# Altium footprint library WR-PHD_Socket Header.PcbLib: 279 footprints (part 12 of 18)
Each footprint in its own frame and in the unit in brackets; x right, y up, seen from the top. Pads: shape width x height; smd on the part's side, far side on the other; paste and mask are expansions set on the pad; w line width, h text height; cw(c..) or ccw(c..) is an arc to the next point about the centre after c.
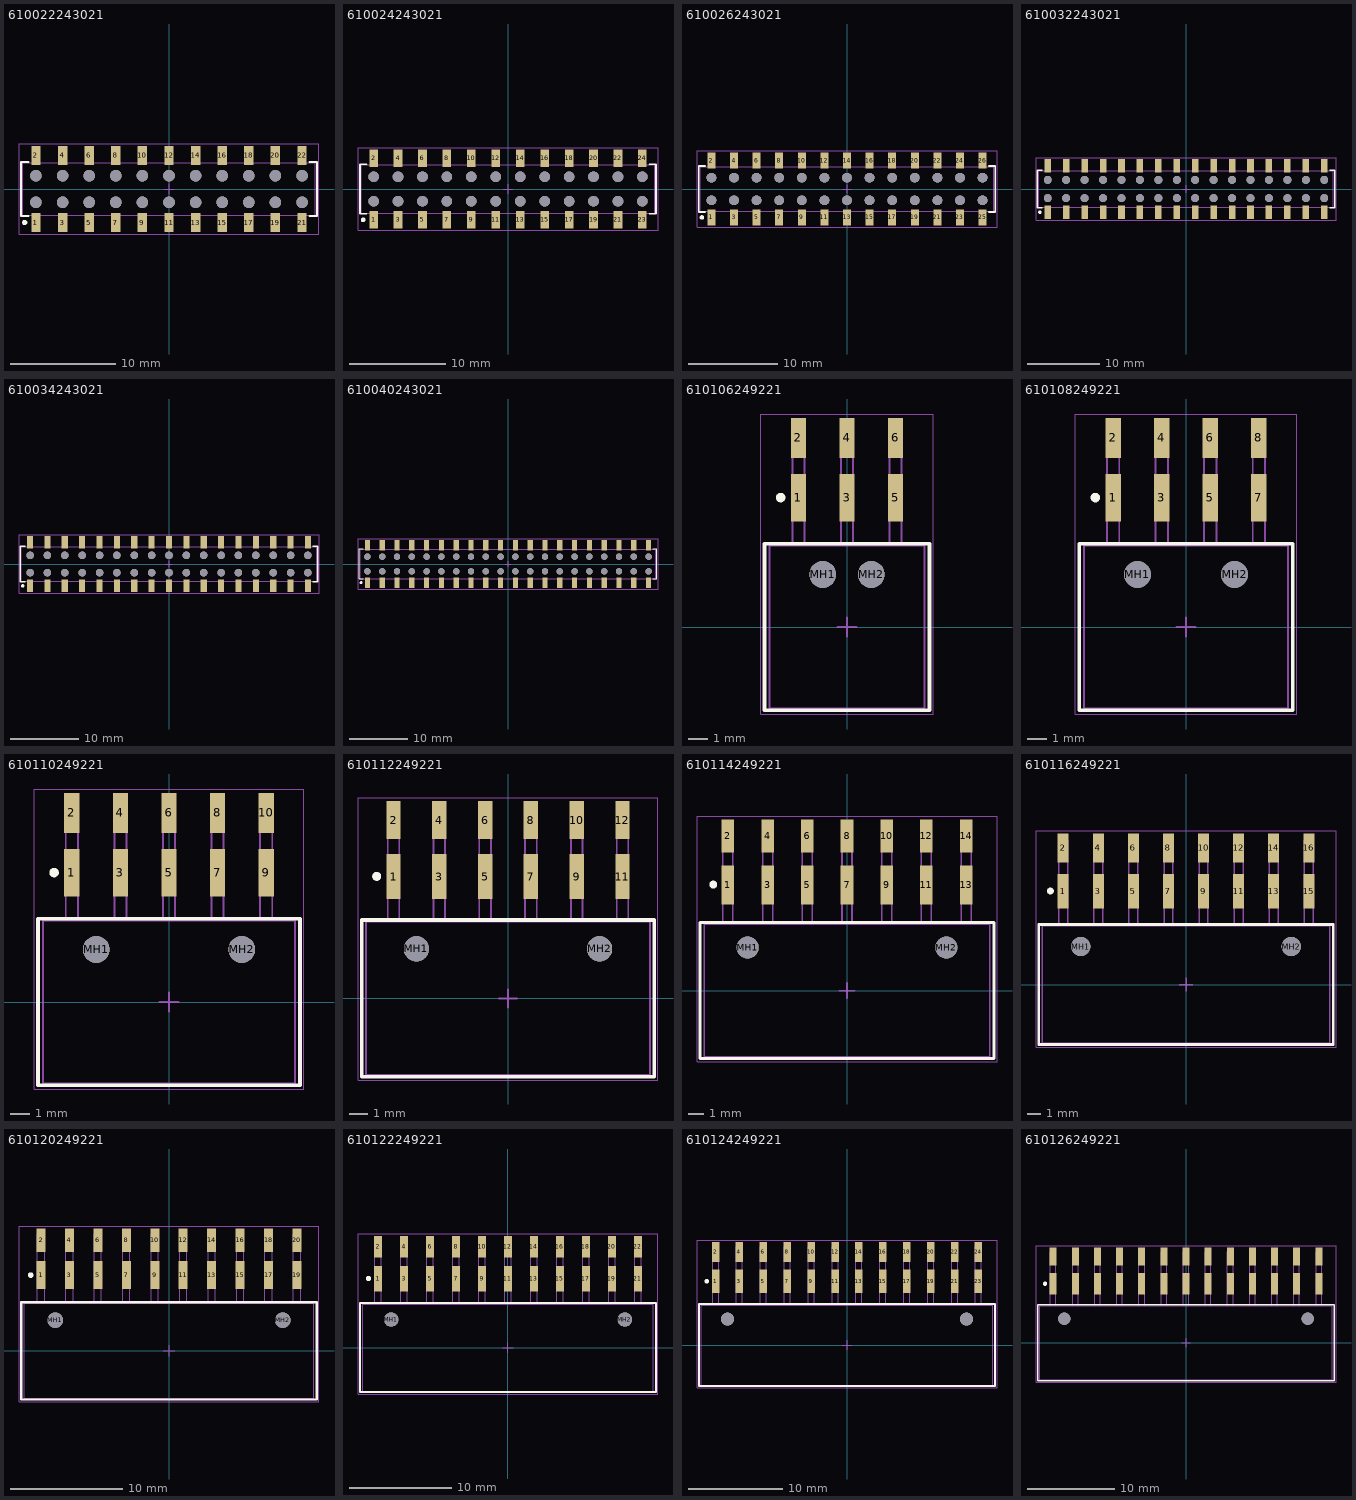
[diagram p11: the footprints below, top view; thin cyan lines are the x and y axes]

## 610022243021 [mm] "Socket Header, Pitch 2.54 mm, SMT, Vertical, dual row, 22p"
height 3.7
pads (44):
  rect 0.9x1.8 smd: 1(-12.7,-3.2) 2(-12.7,3.2) 3(-10.16,-3.2) 4(-10.16,3.2) 5(-7.62,-3.2) 6(-7.62,3.2) 7(-5.08,-3.2) 8(-5.08,3.2) 9(-2.54,-3.2) 10(-2.54,3.2) 11(0,-3.2) 12(0,3.2) 13(2.54,-3.2) 14(2.54,3.2) 15(5.08,-3.2) 16(5.08,3.2) 17(7.62,-3.2) 18(7.62,3.2) 19(10.16,-3.2) 20(10.16,3.2) 21(12.7,-3.2) 22(12.7,3.2)
  round 1.1 hole 1.1 unplated: MH1(-12.7,-1.27) MH2(-12.7,1.27) MH3(-10.16,-1.27) MH4(-10.16,1.27) MH5(-7.62,-1.27) MH6(-7.62,1.27) MH7(-5.08,-1.27) MH8(-5.08,1.27) MH9(-2.54,-1.27) MH10(-2.54,1.27) MH11(0,-1.27) MH12(0,1.27) MH13(2.54,-1.27) MH14(2.54,1.27) MH15(5.08,-1.27) MH16(5.08,1.27) MH17(7.62,-1.27) MH18(7.62,1.27) MH19(10.16,-1.27) MH20(10.16,1.27) MH21(12.7,-1.27) MH22(12.7,1.27)
Top Overlay:
  circle w0.25: c-13.78,-3.2 r0.125
  lines w0.2: -13.43,-2.575 -14.12,-2.575 -14.12,2.575 -13.43,2.575 ; 13.43,-2.575 14.12,-2.575 14.12,2.575 13.43,2.575
Top Component Outline:
  lines w0.1: -12.95,-2.5 -12.95,-3.6 -12.45,-3.6 -12.45,-2.5 ; -12.95,2.5 -12.95,3.6 -12.45,3.6 -12.45,2.5 ; -10.41,-2.5 -10.41,-3.6 -9.91,-3.6 -9.91,-2.5 ; -10.41,2.5 -10.41,3.6 -9.91,3.6 -9.91,2.5 ; -7.87,-2.5 -7.87,-3.6 -7.37,-3.6 -7.37,-2.5 ; -7.87,2.5 -7.87,3.6 -7.37,3.6 -7.37,2.5 ; -5.33,-2.5 -5.33,-3.6 -4.83,-3.6 -4.83,-2.5 ; -5.33,2.5 -5.33,3.6 -4.83,3.6 -4.83,2.5 ; -2.79,-2.5 -2.79,-3.6 -2.29,-3.6 -2.29,-2.5 ; -2.79,2.5 -2.79,3.6 -2.29,3.6 -2.29,2.5 ; -0.25,-2.5 -0.25,-3.6 0.25,-3.6 0.25,-2.5 ; -0.25,2.5 -0.25,3.6 0.25,3.6 0.25,2.5 ; 2.29,-2.5 2.29,-3.6 2.79,-3.6 2.79,-2.5 ; 2.29,2.5 2.29,3.6 2.79,3.6 2.79,2.5 ; 4.83,-2.5 4.83,-3.6 5.33,-3.6 5.33,-2.5 ; 4.83,2.5 4.83,3.6 5.33,3.6 5.33,2.5 ; 7.37,-2.5 7.37,-3.6 7.87,-3.6 7.87,-2.5 ; 7.37,2.5 7.37,3.6 7.87,3.6 7.87,2.5 ; 9.91,-2.5 9.91,-3.6 10.41,-3.6 10.41,-2.5 ; 9.91,2.5 9.91,3.6 10.41,3.6 10.41,2.5 ; 12.45,-2.5 12.45,-3.6 12.95,-3.6 12.95,-2.5 ; 12.45,2.5 12.45,3.6 12.95,3.6 12.95,2.5 ; -13.97,-2.5 -13.97,2.5 13.97,2.5 13.97,-2.5 -13.97,-2.5
Top Designator:
  text ".Designator" at -3.647,-0.357 h1
Top Courtyard:
  lines w0.05: -14.32,-4.3 -14.32,4.3 14.32,4.3 14.32,-4.3 -14.32,-4.3
Top Component Center:
  lines w0.1: -0.5,0 0.5,0 ; 0,-0.5 0,0.5
3D body "610022243021.stp": height 3.7, standoff 0, extent -13.97,-3.603 13.97,3.603

## 610024243021 [mm] "Socket Header, Pitch 2.54 mm, SMT, Vertical, dual row, 24p"
height 3.7
pads (48):
  rect 0.9x1.8 smd: 1(-13.97,-3.2) 2(-13.97,3.2) 3(-11.43,-3.2) 4(-11.43,3.2) 5(-8.89,-3.2) 6(-8.89,3.2) 7(-6.35,-3.2) 8(-6.35,3.2) 9(-3.81,-3.2) 10(-3.81,3.2) 11(-1.27,-3.2) 12(-1.27,3.2) 13(1.27,-3.2) 14(1.27,3.2) 15(3.81,-3.2) 16(3.81,3.2) 17(6.35,-3.2) 18(6.35,3.2) 19(8.89,-3.2) 20(8.89,3.2) 21(11.43,-3.2) 22(11.43,3.2) 23(13.97,-3.2) 24(13.97,3.2)
  round 1.1 hole 1.1 unplated: MH1(-13.97,-1.27) MH2(-13.97,1.27) MH3(-11.43,-1.27) MH4(-11.43,1.27) MH5(-8.89,-1.27) MH6(-8.89,1.27) MH7(-6.35,-1.27) MH8(-6.35,1.27) MH9(-3.81,-1.27) MH10(-3.81,1.27) MH11(-1.27,-1.27) MH12(-1.27,1.27) MH13(1.27,-1.27) MH14(1.27,1.27) MH15(3.81,-1.27) MH16(3.81,1.27) MH17(6.35,-1.27) MH18(6.35,1.27) MH19(8.89,-1.27) MH20(8.89,1.27) MH21(11.43,-1.27) MH22(11.43,1.27) MH23(13.97,-1.27) MH24(13.97,1.27)
Top Overlay:
  circle w0.25: c-15.05,-3.2 r0.125
  lines w0.2: -14.7,-2.575 -15.39,-2.575 -15.39,2.575 -14.7,2.575 ; 14.7,-2.575 15.39,-2.575 15.39,2.575 14.7,2.575
Top Component Outline:
  lines w0.1: -14.22,-2.5 -14.22,-3.6 -13.72,-3.6 -13.72,-2.5 ; -14.22,2.5 -14.22,3.6 -13.72,3.6 -13.72,2.5 ; -11.68,-2.5 -11.68,-3.6 -11.18,-3.6 -11.18,-2.5 ; -11.68,2.5 -11.68,3.6 -11.18,3.6 -11.18,2.5 ; -9.14,-2.5 -9.14,-3.6 -8.64,-3.6 -8.64,-2.5 ; -9.14,2.5 -9.14,3.6 -8.64,3.6 -8.64,2.5 ; -6.6,-2.5 -6.6,-3.6 -6.1,-3.6 -6.1,-2.5 ; -6.6,2.5 -6.6,3.6 -6.1,3.6 -6.1,2.5 ; -4.06,-2.5 -4.06,-3.6 -3.56,-3.6 -3.56,-2.5 ; -4.06,2.5 -4.06,3.6 -3.56,3.6 -3.56,2.5 ; -1.52,-2.5 -1.52,-3.6 -1.02,-3.6 -1.02,-2.5 ; -1.52,2.5 -1.52,3.6 -1.02,3.6 -1.02,2.5 ; 1.02,-2.5 1.02,-3.6 1.52,-3.6 1.52,-2.5 ; 1.02,2.5 1.02,3.6 1.52,3.6 1.52,2.5 ; 3.56,-2.5 3.56,-3.6 4.06,-3.6 4.06,-2.5 ; 3.56,2.5 3.56,3.6 4.06,3.6 4.06,2.5 ; 6.1,-2.5 6.1,-3.6 6.6,-3.6 6.6,-2.5 ; 6.1,2.5 6.1,3.6 6.6,3.6 6.6,2.5 ; 8.64,-2.5 8.64,-3.6 9.14,-3.6 9.14,-2.5 ; 8.64,2.5 8.64,3.6 9.14,3.6 9.14,2.5 ; 11.18,-2.5 11.18,-3.6 11.68,-3.6 11.68,-2.5 ; 11.18,2.5 11.18,3.6 11.68,3.6 11.68,2.5 ; 13.72,-2.5 13.72,-3.6 14.22,-3.6 14.22,-2.5 ; 13.72,2.5 13.72,3.6 14.22,3.6 14.22,2.5 ; -15.24,-2.5 -15.24,2.5 15.24,2.5 15.24,-2.5 -15.24,-2.5
Top Designator:
  text ".Designator" at -3.647,-0.357 h1
Top Courtyard:
  lines w0.05: -15.59,-4.3 -15.59,4.3 15.59,4.3 15.59,-4.3 -15.59,-4.3
Top Component Center:
  lines w0.1: -0.5,0 0.5,0 ; 0,-0.5 0,0.5
3D body "610024243021.stp": height 3.7, standoff 0, extent -15.24,-3.603 15.24,3.603

## 610026243021 [mm] "Socket Header, Pitch 2.54 mm, SMT, Vertical, dual row, 26p"
height 3.7
pads (52):
  rect 0.9x1.8 smd: 1(-15.24,-3.2) 2(-15.24,3.2) 3(-12.7,-3.2) 4(-12.7,3.2) 5(-10.16,-3.2) 6(-10.16,3.2) 7(-7.62,-3.2) 8(-7.62,3.2) 9(-5.08,-3.2) 10(-5.08,3.2) 11(-2.54,-3.2) 12(-2.54,3.2) 13(0,-3.2) 14(0,3.2) 15(2.54,-3.2) 16(2.54,3.2) 17(5.08,-3.2) 18(5.08,3.2) 19(7.62,-3.2) 20(7.62,3.2) 21(10.16,-3.2) 22(10.16,3.2) 23(12.7,-3.2) 24(12.7,3.2) 25(15.24,-3.2) 26(15.24,3.2)
  round 1.1 hole 1.1 unplated: MH1(-15.24,-1.27) MH2(-15.24,1.27) MH3(-12.7,-1.27) MH4(-12.7,1.27) MH5(-10.16,-1.27) MH6(-10.16,1.27) MH7(-7.62,-1.27) MH8(-7.62,1.27) MH9(-5.08,-1.27) MH10(-5.08,1.27) MH11(-2.54,-1.27) MH12(-2.54,1.27) MH13(0,-1.27) MH14(0,1.27) MH15(2.54,-1.27) MH16(2.54,1.27) MH17(5.08,-1.27) MH18(5.08,1.27) MH19(7.62,-1.27) MH20(7.62,1.27) MH21(10.16,-1.27) MH22(10.16,1.27) MH23(12.7,-1.27) MH24(12.7,1.27) MH25(15.24,-1.27) MH26(15.24,1.27)
Top Overlay:
  circle w0.25: c-16.32,-3.2 r0.125
  lines w0.2: -15.97,-2.575 -16.66,-2.575 -16.66,2.575 -15.97,2.575 ; 15.97,-2.575 16.66,-2.575 16.66,2.575 15.97,2.575
Top Component Outline:
  lines w0.1: -15.49,-2.5 -15.49,-3.6 -14.99,-3.6 -14.99,-2.5 ; -15.49,2.5 -15.49,3.6 -14.99,3.6 -14.99,2.5 ; -12.95,-2.5 -12.95,-3.6 -12.45,-3.6 -12.45,-2.5 ; -12.95,2.5 -12.95,3.6 -12.45,3.6 -12.45,2.5 ; -10.41,-2.5 -10.41,-3.6 -9.91,-3.6 -9.91,-2.5 ; -10.41,2.5 -10.41,3.6 -9.91,3.6 -9.91,2.5 ; -7.87,-2.5 -7.87,-3.6 -7.37,-3.6 -7.37,-2.5 ; -7.87,2.5 -7.87,3.6 -7.37,3.6 -7.37,2.5 ; -5.33,-2.5 -5.33,-3.6 -4.83,-3.6 -4.83,-2.5 ; -5.33,2.5 -5.33,3.6 -4.83,3.6 -4.83,2.5 ; -2.79,-2.5 -2.79,-3.6 -2.29,-3.6 -2.29,-2.5 ; -2.79,2.5 -2.79,3.6 -2.29,3.6 -2.29,2.5 ; -0.25,-2.5 -0.25,-3.6 0.25,-3.6 0.25,-2.5 ; -0.25,2.5 -0.25,3.6 0.25,3.6 0.25,2.5 ; 2.29,-2.5 2.29,-3.6 2.79,-3.6 2.79,-2.5 ; 2.29,2.5 2.29,3.6 2.79,3.6 2.79,2.5 ; 4.83,-2.5 4.83,-3.6 5.33,-3.6 5.33,-2.5 ; 4.83,2.5 4.83,3.6 5.33,3.6 5.33,2.5 ; 7.37,-2.5 7.37,-3.6 7.87,-3.6 7.87,-2.5 ; 7.37,2.5 7.37,3.6 7.87,3.6 7.87,2.5 ; 9.91,-2.5 9.91,-3.6 10.41,-3.6 10.41,-2.5 ; 9.91,2.5 9.91,3.6 10.41,3.6 10.41,2.5 ; 12.45,-2.5 12.45,-3.6 12.95,-3.6 12.95,-2.5 ; 12.45,2.5 12.45,3.6 12.95,3.6 12.95,2.5 ; 14.99,-2.5 14.99,-3.6 15.49,-3.6 15.49,-2.5 ; 14.99,2.5 14.99,3.6 15.49,3.6 15.49,2.5 ; -16.51,-2.5 -16.51,2.5 16.51,2.5 16.51,-2.5 -16.51,-2.5
Top Designator:
  text ".Designator" at -3.647,-0.357 h1
Top Courtyard:
  lines w0.05: -16.86,-4.3 16.86,-4.3 16.86,4.3 -16.86,4.3 -16.86,-4.3
Top Component Center:
  lines w0.1: -0.5,0 0.5,0 ; 0,-0.5 0,0.5
3D body "610026243021.stp": height 3.7, standoff 0, extent -16.51,-3.603 16.51,3.603

## 610032243021 [mm] "Socket Header, Pitch 2.54 mm, SMT, Vertical, dual row, 32p"
height 3.7
pads (64):
  rect 0.9x1.8 smd: 1(-19.05,-3.2) 2(-19.05,3.2) 3(-16.51,-3.2) 4(-16.51,3.2) 5(-13.97,-3.2) 6(-13.97,3.2) 7(-11.43,-3.2) 8(-11.43,3.2) 9(-8.89,-3.2) 10(-8.89,3.2) 11(-6.35,-3.2) 12(-6.35,3.2) 13(-3.81,-3.2) 14(-3.81,3.2) 15(-1.27,-3.2) 16(-1.27,3.2) 17(1.27,-3.2) 18(1.27,3.2) 19(3.81,-3.2) 20(3.81,3.2) 21(6.35,-3.2) 22(6.35,3.2) 23(8.89,-3.2) 24(8.89,3.2) 25(11.43,-3.2) 26(11.43,3.2) 27(13.97,-3.2) 28(13.97,3.2) 29(16.51,-3.2) 30(16.51,3.2) 31(19.05,-3.2) 32(19.05,3.2)
  round 1.1 hole 1.1 unplated: MH1(-19.05,-1.27) MH2(-19.05,1.27) MH3(-16.51,-1.27) MH4(-16.51,1.27) MH5(-13.97,-1.27) MH6(-13.97,1.27) MH7(-11.43,-1.27) MH8(-11.43,1.27) MH9(-8.89,-1.27) MH10(-8.89,1.27) MH11(-6.35,-1.27) MH12(-6.35,1.27) MH13(-3.81,-1.27) MH14(-3.81,1.27) MH15(-1.27,-1.27) MH16(-1.27,1.27) MH17(1.27,-1.27) MH18(1.27,1.27) MH19(3.81,-1.27) MH20(3.81,1.27) MH21(6.35,-1.27) MH22(6.35,1.27) MH23(8.89,-1.27) MH24(8.89,1.27) MH25(11.43,-1.27) MH26(11.43,1.27) MH27(13.97,-1.27) MH28(13.97,1.27) MH29(16.51,-1.27) MH30(16.51,1.27) MH31(19.05,-1.27) MH32(19.05,1.27)
Top Overlay:
  circle w0.25: c-20.13,-3.2 r0.125
  lines w0.2: -19.78,-2.575 -20.47,-2.575 -20.47,2.575 -19.78,2.575 ; 19.78,-2.575 20.47,-2.575 20.47,2.575 19.78,2.575
Top Component Outline:
  lines w0.1: -19.3,-2.5 -19.3,-3.6 -18.8,-3.6 -18.8,-2.5 ; -19.3,2.5 -19.3,3.6 -18.8,3.6 -18.8,2.5 ; -16.76,-2.5 -16.76,-3.6 -16.26,-3.6 -16.26,-2.5 ; -16.76,2.5 -16.76,3.6 -16.26,3.6 -16.26,2.5 ; -14.22,-2.5 -14.22,-3.6 -13.72,-3.6 -13.72,-2.5 ; -14.22,2.5 -14.22,3.6 -13.72,3.6 -13.72,2.5 ; -11.68,-2.5 -11.68,-3.6 -11.18,-3.6 -11.18,-2.5 ; -11.68,2.5 -11.68,3.6 -11.18,3.6 -11.18,2.5 ; -9.14,-2.5 -9.14,-3.6 -8.64,-3.6 -8.64,-2.5 ; -9.14,2.5 -9.14,3.6 -8.64,3.6 -8.64,2.5 ; -6.6,-2.5 -6.6,-3.6 -6.1,-3.6 -6.1,-2.5 ; -6.6,2.5 -6.6,3.6 -6.1,3.6 -6.1,2.5 ; -4.06,-2.5 -4.06,-3.6 -3.56,-3.6 -3.56,-2.5 ; -4.06,2.5 -4.06,3.6 -3.56,3.6 -3.56,2.5 ; -1.52,-2.5 -1.52,-3.6 -1.02,-3.6 -1.02,-2.5 ; -1.52,2.5 -1.52,3.6 -1.02,3.6 -1.02,2.5 ; 1.02,-2.5 1.02,-3.6 1.52,-3.6 1.52,-2.5 ; 1.02,2.5 1.02,3.6 1.52,3.6 1.52,2.5 ; 3.56,-2.5 3.56,-3.6 4.06,-3.6 4.06,-2.5 ; 3.56,2.5 3.56,3.6 4.06,3.6 4.06,2.5 ; 6.1,-2.5 6.1,-3.6 6.6,-3.6 6.6,-2.5 ; 6.1,2.5 6.1,3.6 6.6,3.6 6.6,2.5 ; 8.64,-2.5 8.64,-3.6 9.14,-3.6 9.14,-2.5 ; 8.64,2.5 8.64,3.6 9.14,3.6 9.14,2.5 ; 11.18,-2.5 11.18,-3.6 11.68,-3.6 11.68,-2.5 ; 11.18,2.5 11.18,3.6 11.68,3.6 11.68,2.5 ; 13.72,-2.5 13.72,-3.6 14.22,-3.6 14.22,-2.5 ; 13.72,2.5 13.72,3.6 14.22,3.6 14.22,2.5 ; 16.26,-2.5 16.26,-3.6 16.76,-3.6 16.76,-2.5 ; 16.26,2.5 16.26,3.6 16.76,3.6 16.76,2.5 ; 18.8,-2.5 18.8,-3.6 19.3,-3.6 19.3,-2.5 ; 18.8,2.5 18.8,3.6 19.3,3.6 19.3,2.5 ; -20.32,-2.5 -20.32,2.5 20.32,2.5 20.32,-2.5 -20.32,-2.5
Top Designator:
  text ".Designator" at -3.647,-0.357 h1
Top Courtyard:
  lines w0.05: -20.67,-4.3 20.67,-4.3 20.67,4.3 -20.67,4.3 -20.67,-4.3
Top Component Center:
  lines w0.1: -0.5,0 0.5,0 ; 0,-0.5 0,0.5
3D body "610032243021.stp": height 3.7, standoff 0, extent -20.32,-3.603 20.32,3.603

## 610034243021 [mm] "Socket Header, Pitch 2.54 mm, SMT, Vertical, dual row, 34p"
height 3.7
pads (68):
  rect 0.9x1.8 smd: 1(-20.32,-3.2) 2(-20.32,3.2) 3(-17.78,-3.2) 4(-17.78,3.2) 5(-15.24,-3.2) 6(-15.24,3.2) 7(-12.7,-3.2) 8(-12.7,3.2) 9(-10.16,-3.2) 10(-10.16,3.2) 11(-7.62,-3.2) 12(-7.62,3.2) 13(-5.08,-3.2) 14(-5.08,3.2) 15(-2.54,-3.2) 16(-2.54,3.2) 17(0,-3.2) 18(0,3.2) 19(2.54,-3.2) 20(2.54,3.2) 21(5.08,-3.2) 22(5.08,3.2) 23(7.62,-3.2) 24(7.62,3.2) 25(10.16,-3.2) 26(10.16,3.2) 27(12.7,-3.2) 28(12.7,3.2) 29(15.24,-3.2) 30(15.24,3.2) 31(17.78,-3.2) 32(17.78,3.2) 33(20.32,-3.2) 34(20.32,3.2)
  round 1.1 hole 1.1 unplated: MH1(-20.32,-1.27) MH2(-20.32,1.27) MH3(-17.78,-1.27) MH4(-17.78,1.27) MH5(-15.24,-1.27) MH6(-15.24,1.27) MH7(-12.7,-1.27) MH8(-12.7,1.27) MH9(-10.16,-1.27) MH10(-10.16,1.27) MH11(-7.62,-1.27) MH12(-7.62,1.27) MH13(-5.08,-1.27) MH14(-5.08,1.27) MH15(-2.54,-1.27) MH16(-2.54,1.27) MH17(0,-1.27) MH18(0,1.27) MH19(2.54,-1.27) MH20(2.54,1.27) MH21(5.08,-1.27) MH22(5.08,1.27) MH23(7.62,-1.27) MH24(7.62,1.27) MH25(10.16,-1.27) MH26(10.16,1.27) MH27(12.7,-1.27) MH28(12.7,1.27) MH29(15.24,-1.27) MH30(15.24,1.27) MH31(17.78,-1.27) MH32(17.78,1.27) MH33(20.32,-1.27) MH34(20.32,1.27)
Top Overlay:
  circle w0.25: c-21.4,-3.2 r0.125
  lines w0.2: -21.05,-2.575 -21.74,-2.575 -21.74,2.575 -21.05,2.575 ; 21.05,-2.575 21.74,-2.575 21.74,2.575 21.05,2.575
Top Component Outline:
  lines w0.1: -20.57,-2.5 -20.57,-3.6 -20.07,-3.6 -20.07,-2.5 ; -20.57,2.5 -20.57,3.6 -20.07,3.6 -20.07,2.5 ; -18.03,-2.5 -18.03,-3.6 -17.53,-3.6 -17.53,-2.5 ; -18.03,2.5 -18.03,3.6 -17.53,3.6 -17.53,2.5 ; -15.49,-2.5 -15.49,-3.6 -14.99,-3.6 -14.99,-2.5 ; -15.49,2.5 -15.49,3.6 -14.99,3.6 -14.99,2.5 ; -12.95,-2.5 -12.95,-3.6 -12.45,-3.6 -12.45,-2.5 ; -12.95,2.5 -12.95,3.6 -12.45,3.6 -12.45,2.5 ; -10.41,-2.5 -10.41,-3.6 -9.91,-3.6 -9.91,-2.5 ; -10.41,2.5 -10.41,3.6 -9.91,3.6 -9.91,2.5 ; -7.87,-2.5 -7.87,-3.6 -7.37,-3.6 -7.37,-2.5 ; -7.87,2.5 -7.87,3.6 -7.37,3.6 -7.37,2.5 ; -5.33,-2.5 -5.33,-3.6 -4.83,-3.6 -4.83,-2.5 ; -5.33,2.5 -5.33,3.6 -4.83,3.6 -4.83,2.5 ; -2.79,-2.5 -2.79,-3.6 -2.29,-3.6 -2.29,-2.5 ; -2.79,2.5 -2.79,3.6 -2.29,3.6 -2.29,2.5 ; -0.25,-2.5 -0.25,-3.6 0.25,-3.6 0.25,-2.5 ; -0.25,2.5 -0.25,3.6 0.25,3.6 0.25,2.5 ; 2.29,-2.5 2.29,-3.6 2.79,-3.6 2.79,-2.5 ; 2.29,2.5 2.29,3.6 2.79,3.6 2.79,2.5 ; 4.83,-2.5 4.83,-3.6 5.33,-3.6 5.33,-2.5 ; 4.83,2.5 4.83,3.6 5.33,3.6 5.33,2.5 ; 7.37,-2.5 7.37,-3.6 7.87,-3.6 7.87,-2.5 ; 7.37,2.5 7.37,3.6 7.87,3.6 7.87,2.5 ; 9.91,-2.5 9.91,-3.6 10.41,-3.6 10.41,-2.5 ; 9.91,2.5 9.91,3.6 10.41,3.6 10.41,2.5 ; 12.45,-2.5 12.45,-3.6 12.95,-3.6 12.95,-2.5 ; 12.45,2.5 12.45,3.6 12.95,3.6 12.95,2.5 ; 14.99,-2.5 14.99,-3.6 15.49,-3.6 15.49,-2.5 ; 14.99,2.5 14.99,3.6 15.49,3.6 15.49,2.5 ; 17.53,-2.5 17.53,-3.6 18.03,-3.6 18.03,-2.5 ; 17.53,2.5 17.53,3.6 18.03,3.6 18.03,2.5 ; 20.07,-2.5 20.07,-3.6 20.57,-3.6 20.57,-2.5 ; 20.07,2.5 20.07,3.6 20.57,3.6 20.57,2.5 ; -21.59,-2.5 -21.59,2.5 21.59,2.5 21.59,-2.5 -21.59,-2.5
Top Designator:
  text ".Designator" at -3.647,-0.357 h1
Top Courtyard:
  lines w0.05: -21.94,-4.3 21.94,-4.3 21.94,4.3 -21.94,4.3 -21.94,-4.3
Top Component Center:
  lines w0.1: -0.5,0 0.5,0 ; 0,-0.5 0,0.5
3D body "610034243021.stp": height 3.7, standoff 0, extent -21.59,-3.603 21.59,3.603

## 610040243021 [mm] "Socket Header, Pitch 2.54 mm, SMT, Vertical, dual row, 40p"
height 3.7
pads (80):
  rect 0.9x1.8 smd: 1(-24.13,-3.2) 2(-24.13,3.2) 3(-21.59,-3.2) 4(-21.59,3.2) 5(-19.05,-3.2) 6(-19.05,3.2) 7(-16.51,-3.2) 8(-16.51,3.2) 9(-13.97,-3.2) 10(-13.97,3.2) 11(-11.43,-3.2) 12(-11.43,3.2) 13(-8.89,-3.2) 14(-8.89,3.2) 15(-6.35,-3.2) 16(-6.35,3.2) 17(-3.81,-3.2) 18(-3.81,3.2) 19(-1.27,-3.2) 20(-1.27,3.2) 21(1.27,-3.2) 22(1.27,3.2) 23(3.81,-3.2) 24(3.81,3.2) 25(6.35,-3.2) 26(6.35,3.2) 27(8.89,-3.2) 28(8.89,3.2) 29(11.43,-3.2) 30(11.43,3.2) 31(13.97,-3.2) 32(13.97,3.2) 33(16.51,-3.2) 34(16.51,3.2) 35(19.05,-3.2) 36(19.05,3.2) 37(21.59,-3.2) 38(21.59,3.2) 39(24.13,-3.2) 40(24.13,3.2)
  round 1.1 hole 1.1 unplated: MH1(-24.13,-1.27) MH2(-24.13,1.27) MH3(-21.59,-1.27) MH4(-21.59,1.27) MH5(-19.05,-1.27) MH6(-19.05,1.27) MH7(-16.51,-1.27) MH8(-16.51,1.27) MH9(-13.97,-1.27) MH10(-13.97,1.27) MH11(-11.43,-1.27) MH12(-11.43,1.27) MH13(-8.89,-1.27) MH14(-8.89,1.27) MH15(-6.35,-1.27) MH16(-6.35,1.27) MH17(-3.81,-1.27) MH18(-3.81,1.27) MH19(-1.27,-1.27) MH20(-1.27,1.27) MH21(1.27,-1.27) MH22(1.27,1.27) MH23(3.81,-1.27) MH24(3.81,1.27) MH25(6.35,-1.27) MH26(6.35,1.27) MH27(8.89,-1.27) MH28(8.89,1.27) MH29(11.43,-1.27) MH30(11.43,1.27) MH31(13.97,-1.27) MH32(13.97,1.27) MH33(16.51,-1.27) MH34(16.51,1.27) MH35(19.05,-1.27) MH36(19.05,1.27) MH37(21.59,-1.27) MH38(21.59,1.27) MH39(24.13,-1.27) MH40(24.13,1.27)
Top Overlay:
  circle w0.25: c-25.21,-3.2 r0.125
  lines w0.2: -24.86,-2.575 -25.55,-2.575 -25.55,2.575 -24.86,2.575 ; 24.86,-2.575 25.55,-2.575 25.55,2.575 24.86,2.575
Top Component Outline:
  lines w0.1: -24.38,-2.5 -24.38,-3.6 -23.88,-3.6 -23.88,-2.5 ; -24.38,2.5 -24.38,3.6 -23.88,3.6 -23.88,2.5 ; -21.84,-2.5 -21.84,-3.6 -21.34,-3.6 -21.34,-2.5 ; -21.84,2.5 -21.84,3.6 -21.34,3.6 -21.34,2.5 ; -19.3,-2.5 -19.3,-3.6 -18.8,-3.6 -18.8,-2.5 ; -19.3,2.5 -19.3,3.6 -18.8,3.6 -18.8,2.5 ; -16.76,-2.5 -16.76,-3.6 -16.26,-3.6 -16.26,-2.5 ; -16.76,2.5 -16.76,3.6 -16.26,3.6 -16.26,2.5 ; -14.22,-2.5 -14.22,-3.6 -13.72,-3.6 -13.72,-2.5 ; -14.22,2.5 -14.22,3.6 -13.72,3.6 -13.72,2.5 ; -11.68,-2.5 -11.68,-3.6 -11.18,-3.6 -11.18,-2.5 ; -11.68,2.5 -11.68,3.6 -11.18,3.6 -11.18,2.5 ; -9.14,-2.5 -9.14,-3.6 -8.64,-3.6 -8.64,-2.5 ; -9.14,2.5 -9.14,3.6 -8.64,3.6 -8.64,2.5 ; -6.6,-2.5 -6.6,-3.6 -6.1,-3.6 -6.1,-2.5 ; -6.6,2.5 -6.6,3.6 -6.1,3.6 -6.1,2.5 ; -4.06,-2.5 -4.06,-3.6 -3.56,-3.6 -3.56,-2.5 ; -4.06,2.5 -4.06,3.6 -3.56,3.6 -3.56,2.5 ; -1.52,-2.5 -1.52,-3.6 -1.02,-3.6 -1.02,-2.5 ; -1.52,2.5 -1.52,3.6 -1.02,3.6 -1.02,2.5 ; 1.02,-2.5 1.02,-3.6 1.52,-3.6 1.52,-2.5 ; 1.02,2.5 1.02,3.6 1.52,3.6 1.52,2.5 ; 3.56,-2.5 3.56,-3.6 4.06,-3.6 4.06,-2.5 ; 3.56,2.5 3.56,3.6 4.06,3.6 4.06,2.5 ; 6.1,-2.5 6.1,-3.6 6.6,-3.6 6.6,-2.5 ; 6.1,2.5 6.1,3.6 6.6,3.6 6.6,2.5 ; 8.64,-2.5 8.64,-3.6 9.14,-3.6 9.14,-2.5 ; 8.64,2.5 8.64,3.6 9.14,3.6 9.14,2.5 ; 11.18,-2.5 11.18,-3.6 11.68,-3.6 11.68,-2.5 ; 11.18,2.5 11.18,3.6 11.68,3.6 11.68,2.5 ; 13.72,-2.5 13.72,-3.6 14.22,-3.6 14.22,-2.5 ; 13.72,2.5 13.72,3.6 14.22,3.6 14.22,2.5 ; 16.26,-2.5 16.26,-3.6 16.76,-3.6 16.76,-2.5 ; 16.26,2.5 16.26,3.6 16.76,3.6 16.76,2.5 ; 18.8,-2.5 18.8,-3.6 19.3,-3.6 19.3,-2.5 ; 18.8,2.5 18.8,3.6 19.3,3.6 19.3,2.5 ; 21.34,-2.5 21.34,-3.6 21.84,-3.6 21.84,-2.5 ; 21.34,2.5 21.34,3.6 21.84,3.6 21.84,2.5 ; 23.88,-2.5 23.88,-3.6 24.38,-3.6 24.38,-2.5 ; 23.88,2.5 23.88,3.6 24.38,3.6 24.38,2.5 ; -25.4,-2.5 25.4,-2.5 25.4,2.5 -25.4,2.5 -25.4,-2.5
Top Designator:
  text ".Designator" at -3.647,-0.357 h1
Top Courtyard:
  lines w0.05: -25.75,-4.3 -25.75,4.3 25.75,4.3 25.75,-4.3 -25.75,-4.3
Top Component Center:
  lines w0.1: -0.5,0 0.5,0 ; 0,-0.5 0,0.5
3D body "610040243021.stp": height 3.7, standoff 0, extent -25.4,-3.601 25.4,3.601

## 610106249221 [mm] "Socket Header, Pitch 2.54 mm, SMT, Angled, dual row, 6p"
height 5.2
pads (8):
  rect 0.8x2.5 smd: 1(-2.54,6.76) 3(0,6.76) 5(2.54,6.76)
  rect 0.8x2.1 smd: 2(-2.54,9.89) 4(0,9.89) 6(2.54,9.89)
  round 1.4 hole 1.4 unplated: MH1(-1.27,2.75) MH2(1.27,2.75)
Top Overlay:
  circle w0.25: c-3.471,6.77 r0.125
  lines w0.2: -4.31,-4.35 -4.31,4.35 4.31,4.35 4.31,-4.35 -4.31,-4.35
Top Component Outline:
  lines w0.1: -2.86,4.25 -2.86,10.44 -2.22,10.44 -2.22,4.25 ; -2.86,7.49 -2.22,7.49 ; -0.32,4.25 -0.32,10.44 0.32,10.44 0.32,4.25 ; -0.32,7.49 0.32,7.49 ; 2.22,4.25 2.22,10.44 2.86,10.44 2.86,4.25 ; 2.22,7.49 2.86,7.49 ; -4.06,-4.25 -4.06,4.25 4.06,4.25 4.06,-4.25 -4.06,-4.25
Top Designator:
  text ".Designator" at -3.647,-0.357 h1
Top Courtyard:
  lines w0.05: -4.51,-4.55 4.51,-4.55 4.51,11.14 -4.51,11.14 -4.51,-4.55
Top Component Center:
  lines w0.1: -0.5,0 0.5,0 ; 0,-0.5 0,0.5
3D body "610106249221.stp": height 5.03, standoff -1.27, extent -4.06,-4.25 4.06,10.44

## 610108249221 [mm] "Socket Header, Pitch 2.54 mm, SMT, Angled, dual row, 8p"
height 5.2
pads (10):
  rect 0.8x2.5 smd: 1(-3.81,6.76) 3(-1.27,6.76) 5(1.27,6.76) 7(3.81,6.76)
  rect 0.8x2.1 smd: 2(-3.81,9.89) 4(-1.27,9.89) 6(1.27,9.89) 8(3.81,9.89)
  round 1.4 hole 1.4 unplated: MH1(-2.54,2.75) MH2(2.54,2.75)
Top Overlay:
  circle w0.25: c-4.741,6.77 r0.125
  lines w0.2: -5.58,-4.35 -5.58,4.35 5.58,4.35 5.58,-4.35 -5.58,-4.35
Top Component Outline:
  lines w0.1: -4.13,4.25 -4.13,10.44 -3.49,10.44 -3.49,4.25 ; -4.13,7.49 -3.49,7.49 ; -1.59,4.25 -1.59,10.44 -0.95,10.44 -0.95,4.25 ; -1.59,7.49 -0.95,7.49 ; 0.95,4.25 0.95,10.44 1.59,10.44 1.59,4.25 ; 0.95,7.49 1.59,7.49 ; 3.49,4.25 3.49,10.44 4.13,10.44 4.13,4.25 ; 3.49,7.49 4.13,7.49 ; -5.33,-4.25 -5.33,4.25 5.33,4.25 5.33,-4.25 -5.33,-4.25
Top Designator:
  text ".Designator" at -3.647,-0.357 h1
Top Courtyard:
  lines w0.05: -5.78,-4.55 5.78,-4.55 5.78,11.14 -5.78,11.14 -5.78,-4.55
Top Component Center:
  lines w0.1: -0.5,0 0.5,0 ; 0,-0.5 0,0.5
3D body "610108249221.stp": height 5.03, standoff -1.27, extent -5.33,-4.25 5.33,10.44

## 610110249221 [mm] "Socket Header, Pitch 2.54 mm, SMT, Angled, dual row, 10p"
height 5.2
pads (12):
  rect 0.8x2.5 smd: 1(-5.08,6.76) 3(-2.54,6.76) 5(0,6.76) 7(2.54,6.76) 9(5.08,6.76)
  rect 0.8x2.1 smd: 2(-5.08,9.89) 4(-2.54,9.89) 6(0,9.89) 8(2.54,9.89) 10(5.08,9.89)
  round 1.4 hole 1.4 unplated: MH1(-3.81,2.75) MH2(3.81,2.75)
Top Overlay:
  circle w0.25: c-6.011,6.77 r0.125
  lines w0.2: -6.85,-4.35 -6.85,4.35 6.85,4.35 6.85,-4.35 -6.85,-4.35
Top Component Outline:
  lines w0.1: -5.4,4.25 -5.4,10.44 -4.76,10.44 -4.76,4.25 ; -5.4,7.49 -4.76,7.49 ; -2.86,4.25 -2.86,10.44 -2.22,10.44 -2.22,4.25 ; -2.86,7.49 -2.22,7.49 ; -0.32,4.25 -0.32,10.44 0.32,10.44 0.32,4.25 ; -0.32,7.49 0.32,7.49 ; 2.22,4.25 2.22,10.44 2.86,10.44 2.86,4.25 ; 2.22,7.49 2.86,7.49 ; 4.76,4.25 4.76,10.44 5.4,10.44 5.4,4.25 ; 4.76,7.49 5.4,7.49 ; -6.6,-4.25 6.6,-4.25 6.6,4.25 -6.6,4.25 -6.6,-4.25
Top Designator:
  text ".Designator" at -3.647,-0.357 h1
Top Courtyard:
  lines w0.05: -7.05,-4.55 7.05,-4.55 7.05,11.14 -7.05,11.14 -7.05,-4.55
Top Component Center:
  lines w0.1: -0.5,0 0.5,0 ; 0,-0.5 0,0.5
3D body "610110249221.stp": height 5.03, standoff -1.27, extent -6.6,-4.25 6.6,10.44

## 610112249221 [mm] "Socket Header, Pitch 2.54 mm, SMT, Angled, dual row, 12p"
height 5.2
pads (14):
  rect 0.8x2.5 smd: 1(-6.35,6.76) 3(-3.81,6.76) 5(-1.27,6.76) 7(1.27,6.76) 9(3.81,6.76) 11(6.35,6.76)
  rect 0.8x2.1 smd: 2(-6.35,9.89) 4(-3.81,9.89) 6(-1.27,9.89) 8(1.27,9.89) 10(3.81,9.89) 12(6.35,9.89)
  round 1.4 hole 1.4 unplated: MH1(-5.08,2.75) MH2(5.08,2.75)
Top Overlay:
  circle w0.25: c-7.281,6.77 r0.125
  lines w0.2: -8.12,-4.35 8.12,-4.35 8.12,4.35 -8.12,4.35 -8.12,-4.35
Top Component Outline:
  lines w0.1: -6.67,4.25 -6.67,10.44 -6.03,10.44 -6.03,4.25 ; -6.67,7.49 -6.03,7.49 ; -4.13,4.25 -4.13,10.44 -3.49,10.44 -3.49,4.25 ; -4.13,7.49 -3.49,7.49 ; -1.59,4.25 -1.59,10.44 -0.95,10.44 -0.95,4.25 ; -1.59,7.49 -0.95,7.49 ; 0.95,4.25 0.95,10.44 1.59,10.44 1.59,4.25 ; 0.95,7.49 1.59,7.49 ; 3.49,4.25 3.49,10.44 4.13,10.44 4.13,4.25 ; 3.49,7.49 4.13,7.49 ; 6.03,4.25 6.03,10.44 6.67,10.44 6.67,4.25 ; 6.03,7.49 6.67,7.49 ; -7.87,-4.25 -7.87,4.25 7.87,4.25 7.87,-4.25 -7.87,-4.25
Top Designator:
  text ".Designator" at -3.647,-0.357 h1
Top Courtyard:
  lines w0.05: -8.32,-4.55 -8.32,11.14 8.32,11.14 8.32,-4.55 -8.32,-4.55
Top Component Center:
  lines w0.1: -0.5,0 0.5,0 ; 0,-0.5 0,0.5
3D body "610112249221.stp": height 5.03, standoff -1.27, extent -7.87,-4.25 7.87,10.44

## 610114249221 [mm] "Socket Header, Pitch 2.54 mm, SMT, Angled, dual row, 14p"
height 5.2
pads (16):
  rect 0.8x2.5 smd: 1(-7.62,6.76) 3(-5.08,6.76) 5(-2.54,6.76) 7(0,6.76) 9(2.54,6.76) 11(5.08,6.76) 13(7.62,6.76)
  rect 0.8x2.1 smd: 2(-7.62,9.89) 4(-5.08,9.89) 6(-2.54,9.89) 8(0,9.89) 10(2.54,9.89) 12(5.08,9.89) 14(7.62,9.89)
  round 1.4 hole 1.4 unplated: MH1(-6.35,2.75) MH2(6.35,2.75)
Top Overlay:
  circle w0.25: c-8.551,6.77 r0.125
  lines w0.2: -9.39,-4.35 -9.39,4.35 9.39,4.35 9.39,-4.35 -9.39,-4.35
Top Component Outline:
  lines w0.1: -7.94,4.25 -7.94,10.44 -7.3,10.44 -7.3,4.25 ; -7.94,7.49 -7.3,7.49 ; -5.4,4.25 -5.4,10.44 -4.76,10.44 -4.76,4.25 ; -5.4,7.49 -4.76,7.49 ; -2.86,4.25 -2.86,10.44 -2.22,10.44 -2.22,4.25 ; -2.86,7.49 -2.22,7.49 ; -0.32,4.25 -0.32,10.44 0.32,10.44 0.32,4.25 ; -0.32,7.49 0.32,7.49 ; 2.22,4.25 2.22,10.44 2.86,10.44 2.86,4.25 ; 2.22,7.49 2.86,7.49 ; 4.76,4.25 4.76,10.44 5.4,10.44 5.4,4.25 ; 4.76,7.49 5.4,7.49 ; 7.3,4.25 7.3,10.44 7.94,10.44 7.94,4.25 ; 7.3,7.49 7.94,7.49 ; -9.14,-4.25 -9.14,4.25 9.14,4.25 9.14,-4.25 -9.14,-4.25
Top Designator:
  text ".Designator" at -3.647,-0.357 h1
Top Courtyard:
  lines w0.05: -9.59,-4.55 9.59,-4.55 9.59,11.14 -9.59,11.14 -9.59,-4.55
Top Component Center:
  lines w0.1: -0.5,0 0.5,0 ; 0,-0.5 0,0.5
3D body "610114249221.stp": height 5.03, standoff -1.27, extent -9.14,-4.25 9.14,10.44

## 610116249221 [mm] "Socket Header, Pitch 2.54 mm, SMT, Angled, dual row, 16p"
height 5.2
pads (18):
  rect 0.8x2.5 smd: 1(-8.89,6.76) 3(-6.35,6.76) 5(-3.81,6.76) 7(-1.27,6.76) 9(1.27,6.76) 11(3.81,6.76) 13(6.35,6.76) 15(8.89,6.76)
  rect 0.8x2.1 smd: 2(-8.89,9.89) 4(-6.35,9.89) 6(-3.81,9.89) 8(-1.27,9.89) 10(1.27,9.89) 12(3.81,9.89) 14(6.35,9.89) 16(8.89,9.89)
  round 1.4 hole 1.4 unplated: MH1(-7.62,2.75) MH2(7.62,2.75)
Top Overlay:
  circle w0.25: c-9.821,6.77 r0.125
  lines w0.2: -10.66,-4.35 10.66,-4.35 10.66,4.35 -10.66,4.35 -10.66,-4.35
Top Component Outline:
  lines w0.1: -9.21,4.25 -9.21,10.44 -8.57,10.44 -8.57,4.25 ; -9.21,7.49 -8.57,7.49 ; -6.67,4.25 -6.67,10.44 -6.03,10.44 -6.03,4.25 ; -6.67,7.49 -6.03,7.49 ; -4.13,4.25 -4.13,10.44 -3.49,10.44 -3.49,4.25 ; -4.13,7.49 -3.49,7.49 ; -1.59,4.25 -1.59,10.44 -0.95,10.44 -0.95,4.25 ; -1.59,7.49 -0.95,7.49 ; 0.95,4.25 0.95,10.44 1.59,10.44 1.59,4.25 ; 0.95,7.49 1.59,7.49 ; 3.49,4.25 3.49,10.44 4.13,10.44 4.13,4.25 ; 3.49,7.49 4.13,7.49 ; 6.03,4.25 6.03,10.44 6.67,10.44 6.67,4.25 ; 6.03,7.49 6.67,7.49 ; 8.57,4.25 8.57,10.44 9.21,10.44 9.21,4.25 ; 8.57,7.49 9.21,7.49 ; -10.41,-4.25 -10.41,4.25 10.41,4.25 10.41,-4.25 -10.41,-4.25
Top Designator:
  text ".Designator" at -3.647,-0.357 h1
Top Courtyard:
  lines w0.05: -10.86,-4.55 -10.86,11.14 10.86,11.14 10.86,-4.55 -10.86,-4.55
Top Component Center:
  lines w0.1: -0.5,0 0.5,0 ; 0,-0.5 0,0.5
3D body "610116249221.stp": height 5.03, standoff -1.27, extent -10.41,-4.25 10.41,10.44

## 610120249221 [mm] "Socket Header, Pitch 2.54 mm, SMT, Angled, dual row, 20p"
height 5.2
pads (22):
  rect 0.8x2.5 smd: 1(-11.43,6.76) 3(-8.89,6.76) 5(-6.35,6.76) 7(-3.81,6.76) 9(-1.27,6.76) 11(1.27,6.76) 13(3.81,6.76) 15(6.35,6.76) 17(8.89,6.76) 19(11.43,6.76)
  rect 0.8x2.1 smd: 2(-11.43,9.89) 4(-8.89,9.89) 6(-6.35,9.89) 8(-3.81,9.89) 10(-1.27,9.89) 12(1.27,9.89) 14(3.81,9.89) 16(6.35,9.89) 18(8.89,9.89) 20(11.43,9.89)
  round 1.4 hole 1.4 unplated: MH1(-10.16,2.75) MH2(10.16,2.75)
Top Overlay:
  circle w0.25: c-12.361,6.77 r0.125
  lines w0.2: -13.2,-4.35 13.2,-4.35 13.2,4.35 -13.2,4.35 -13.2,-4.35
Top Component Outline:
  lines w0.1: -11.75,4.25 -11.75,10.44 -11.11,10.44 -11.11,4.25 ; -11.75,7.49 -11.11,7.49 ; -9.21,4.25 -9.21,10.44 -8.57,10.44 -8.57,4.25 ; -9.21,7.49 -8.57,7.49 ; -6.67,4.25 -6.67,10.44 -6.03,10.44 -6.03,4.25 ; -6.67,7.49 -6.03,7.49 ; -4.13,4.25 -4.13,10.44 -3.49,10.44 -3.49,4.25 ; -4.13,7.49 -3.49,7.49 ; -1.59,4.25 -1.59,10.44 -0.95,10.44 -0.95,4.25 ; -1.59,7.49 -0.95,7.49 ; 0.95,4.25 0.95,10.44 1.59,10.44 1.59,4.25 ; 0.95,7.49 1.59,7.49 ; 3.49,4.25 3.49,10.44 4.13,10.44 4.13,4.25 ; 3.49,7.49 4.13,7.49 ; 6.03,4.25 6.03,10.44 6.67,10.44 6.67,4.25 ; 6.03,7.49 6.67,7.49 ; 8.57,4.25 8.57,10.44 9.21,10.44 9.21,4.25 ; 8.57,7.49 9.21,7.49 ; 11.11,4.25 11.11,10.44 11.75,10.44 11.75,4.25 ; 11.11,7.49 11.75,7.49 ; -12.95,-4.25 -12.95,4.25 12.95,4.25 12.95,-4.25 -12.95,-4.25
Top Designator:
  text ".Designator" at -3.647,-0.357 h1
Top Courtyard:
  lines w0.05: -13.4,-4.55 -13.4,11.14 13.4,11.14 13.4,-4.55 -13.4,-4.55
Top Component Center:
  lines w0.1: -0.5,0 0.5,0 ; 0,-0.5 0,0.5
3D body "610120249221.stp": height 5.03, standoff -1.27, extent -12.95,-4.25 12.95,10.44

## 610122249221 [mm] "Socket Header, Pitch 2.54 mm, SMT, Angled, dual row, 22p"
height 5.2
pads (24):
  rect 0.8x2.5 smd: 1(-12.7,6.76) 3(-10.16,6.76) 5(-7.62,6.76) 7(-5.08,6.76) 9(-2.54,6.76) 11(0,6.76) 13(2.54,6.76) 15(5.08,6.76) 17(7.62,6.76) 19(10.16,6.76) 21(12.7,6.76)
  rect 0.8x2.1 smd: 2(-12.7,9.89) 4(-10.16,9.89) 6(-7.62,9.89) 8(-5.08,9.89) 10(-2.54,9.89) 12(0,9.89) 14(2.54,9.89) 16(5.08,9.89) 18(7.62,9.89) 20(10.16,9.89) 22(12.7,9.89)
  round 1.4 hole 1.4 unplated: MH1(-11.43,2.75) MH2(11.43,2.75)
Top Overlay:
  circle w0.25: c-13.631,6.77 r0.125
  lines w0.2: -14.47,-4.35 14.47,-4.35 14.47,4.35 -14.47,4.35 -14.47,-4.35
Top Component Outline:
  lines w0.1: -13.02,4.25 -13.02,10.44 -12.38,10.44 -12.38,4.25 ; -13.02,7.49 -12.38,7.49 ; -10.48,4.25 -10.48,10.44 -9.84,10.44 -9.84,4.25 ; -10.48,7.49 -9.84,7.49 ; -7.94,4.25 -7.94,10.44 -7.3,10.44 -7.3,4.25 ; -7.94,7.49 -7.3,7.49 ; -5.4,4.25 -5.4,10.44 -4.76,10.44 -4.76,4.25 ; -5.4,7.49 -4.76,7.49 ; -2.86,4.25 -2.86,10.44 -2.22,10.44 -2.22,4.25 ; -2.86,7.49 -2.22,7.49 ; -0.32,4.25 -0.32,10.44 0.32,10.44 0.32,4.25 ; -0.32,7.49 0.32,7.49 ; 2.22,4.25 2.22,10.44 2.86,10.44 2.86,4.25 ; 2.22,7.49 2.86,7.49 ; 4.76,4.25 4.76,10.44 5.4,10.44 5.4,4.25 ; 4.76,7.49 5.4,7.49 ; 7.3,4.25 7.3,10.44 7.94,10.44 7.94,4.25 ; 7.3,7.49 7.94,7.49 ; 9.84,4.25 9.84,10.44 10.48,10.44 10.48,4.25 ; 9.84,7.49 10.48,7.49 ; 12.38,4.25 12.38,10.44 13.02,10.44 13.02,4.25 ; 12.38,7.49 13.02,7.49 ; -14.22,-4.25 14.22,-4.25 14.22,4.25 -14.22,4.25 -14.22,-4.25
Top Designator:
  text ".Designator" at -3.647,-0.357 h1
Top Courtyard:
  lines w0.05: -14.67,-4.55 -14.67,11.14 14.67,11.14 14.67,-4.55 -14.67,-4.55
Top Component Center:
  lines w0.1: -0.5,0 0.5,0 ; 0,-0.5 0,0.5
3D body "610122249221.stp": height 5.03, standoff -1.27, extent -14.22,-4.25 14.22,10.44

## 610124249221 [mm] "Socket Header, Pitch 2.54 mm, SMT, Angled, dual row, 24p"
height 5.2
pads (26):
  rect 0.8x2.5 smd: 1(-13.97,6.76) 3(-11.43,6.76) 5(-8.89,6.76) 7(-6.35,6.76) 9(-3.81,6.76) 11(-1.27,6.76) 13(1.27,6.76) 15(3.81,6.76) 17(6.35,6.76) 19(8.89,6.76) 21(11.43,6.76) 23(13.97,6.76)
  rect 0.8x2.1 smd: 2(-13.97,9.89) 4(-11.43,9.89) 6(-8.89,9.89) 8(-6.35,9.89) 10(-3.81,9.89) 12(-1.27,9.89) 14(1.27,9.89) 16(3.81,9.89) 18(6.35,9.89) 20(8.89,9.89) 22(11.43,9.89) 24(13.97,9.89)
  round 1.4 hole 1.4 unplated: MH1(-12.7,2.75) MH2(12.7,2.75)
Top Overlay:
  circle w0.25: c-14.901,6.77 r0.125
  lines w0.2: -15.74,-4.35 15.74,-4.35 15.74,4.35 -15.74,4.35 -15.74,-4.35
Top Component Outline:
  lines w0.1: -14.29,4.25 -14.29,10.44 -13.65,10.44 -13.65,4.25 ; -14.29,7.49 -13.65,7.49 ; -11.75,4.25 -11.75,10.44 -11.11,10.44 -11.11,4.25 ; -11.75,7.49 -11.11,7.49 ; -9.21,4.25 -9.21,10.44 -8.57,10.44 -8.57,4.25 ; -9.21,7.49 -8.57,7.49 ; -6.67,4.25 -6.67,10.44 -6.03,10.44 -6.03,4.25 ; -6.67,7.49 -6.03,7.49 ; -4.13,4.25 -4.13,10.44 -3.49,10.44 -3.49,4.25 ; -4.13,7.49 -3.49,7.49 ; -1.59,4.25 -1.59,10.44 -0.95,10.44 -0.95,4.25 ; -1.59,7.49 -0.95,7.49 ; 0.95,4.25 0.95,10.44 1.59,10.44 1.59,4.25 ; 0.95,7.49 1.59,7.49 ; 3.49,4.25 3.49,10.44 4.13,10.44 4.13,4.25 ; 3.49,7.49 4.13,7.49 ; 6.03,4.25 6.03,10.44 6.67,10.44 6.67,4.25 ; 6.03,7.49 6.67,7.49 ; 8.57,4.25 8.57,10.44 9.21,10.44 9.21,4.25 ; 8.57,7.49 9.21,7.49 ; 11.11,4.25 11.11,10.44 11.75,10.44 11.75,4.25 ; 11.11,7.49 11.75,7.49 ; 13.65,4.25 13.65,10.44 14.29,10.44 14.29,4.25 ; 13.65,7.49 14.29,7.49 ; -15.49,-4.25 -15.49,4.25 15.49,4.25 15.49,-4.25 -15.49,-4.25
Top Designator:
  text ".Designator" at -3.647,-0.357 h1
Top Courtyard:
  lines w0.05: -15.94,-4.55 -15.94,11.14 15.94,11.14 15.94,-4.55 -15.94,-4.55
Top Component Center:
  lines w0.1: -0.5,0 0.5,0 ; 0,-0.5 0,0.5
3D body "610124249221.stp": height 5.03, standoff -1.27, extent -15.49,-4.25 15.49,10.44

## 610126249221 [mm] "Socket Header, Pitch 2.54 mm, SMT, Angled, dual row, 26p"
height 5.2
pads (28):
  rect 0.8x2.5 smd: 1(-15.24,6.76) 3(-12.7,6.76) 5(-10.16,6.76) 7(-7.62,6.76) 9(-5.08,6.76) 11(-2.54,6.76) 13(0,6.76) 15(2.54,6.76) 17(5.08,6.76) 19(7.62,6.76) 21(10.16,6.76) 23(12.7,6.76) 25(15.24,6.76)
  rect 0.8x2.1 smd: 2(-15.24,9.89) 4(-12.7,9.89) 6(-10.16,9.89) 8(-7.62,9.89) 10(-5.08,9.89) 12(-2.54,9.89) 14(0,9.89) 16(2.54,9.89) 18(5.08,9.89) 20(7.62,9.89) 22(10.16,9.89) 24(12.7,9.89) 26(15.24,9.89)
  round 1.4 hole 1.4 unplated: MH1(-13.97,2.75) MH2(13.97,2.75)
Top Overlay:
  circle w0.25: c-16.171,6.77 r0.125
  lines w0.2: -17.01,-4.35 17.01,-4.35 17.01,4.35 -17.01,4.35 -17.01,-4.35
Top Component Outline:
  lines w0.1: -15.56,4.25 -15.56,10.44 -14.92,10.44 -14.92,4.25 ; -15.56,7.49 -14.92,7.49 ; -13.02,4.25 -13.02,10.44 -12.38,10.44 -12.38,4.25 ; -13.02,7.49 -12.38,7.49 ; -10.48,4.25 -10.48,10.44 -9.84,10.44 -9.84,4.25 ; -10.48,7.49 -9.84,7.49 ; -7.94,4.25 -7.94,10.44 -7.3,10.44 -7.3,4.25 ; -7.94,7.49 -7.3,7.49 ; -5.4,4.25 -5.4,10.44 -4.76,10.44 -4.76,4.25 ; -5.4,7.49 -4.76,7.49 ; -2.86,4.25 -2.86,10.44 -2.22,10.44 -2.22,4.25 ; -2.86,7.49 -2.22,7.49 ; -0.32,4.25 -0.32,10.44 0.32,10.44 0.32,4.25 ; -0.32,7.49 0.32,7.49 ; 2.22,4.25 2.22,10.44 2.86,10.44 2.86,4.25 ; 2.22,7.49 2.86,7.49 ; 4.76,4.25 4.76,10.44 5.4,10.44 5.4,4.25 ; 4.76,7.49 5.4,7.49 ; 7.3,4.25 7.3,10.44 7.94,10.44 7.94,4.25 ; 7.3,7.49 7.94,7.49 ; 9.84,4.25 9.84,10.44 10.48,10.44 10.48,4.25 ; 9.84,7.49 10.48,7.49 ; 12.38,4.25 12.38,10.44 13.02,10.44 13.02,4.25 ; 12.38,7.49 13.02,7.49 ; 14.92,4.25 14.92,10.44 15.56,10.44 15.56,4.25 ; 14.92,7.49 15.56,7.49 ; -16.76,-4.25 -16.76,4.25 16.76,4.25 16.76,-4.25 -16.76,-4.25
Top Designator:
  text ".Designator" at -3.647,-0.357 h1
Top Courtyard:
  lines w0.05: -17.21,-4.55 -17.21,11.14 17.21,11.14 17.21,-4.55 -17.21,-4.55
Top Component Center:
  lines w0.1: -0.5,0 0.5,0 ; 0,-0.5 0,0.5
3D body "610126249221.stp": height 5.03, standoff -1.27, extent -16.76,-4.25 16.76,10.44